# Altium footprint library PcbLib1.PcbLib: 24 footprints (part 1 of 2)
Each footprint in its own frame and in the unit in brackets; x right, y up, seen from the top. Pads: shape width x height; smd on the part's side, far side on the other; paste and mask are expansions set on the pad; w line width, h text height; cw(c..) or ccw(c..) is an arc to the next point about the centre after c.
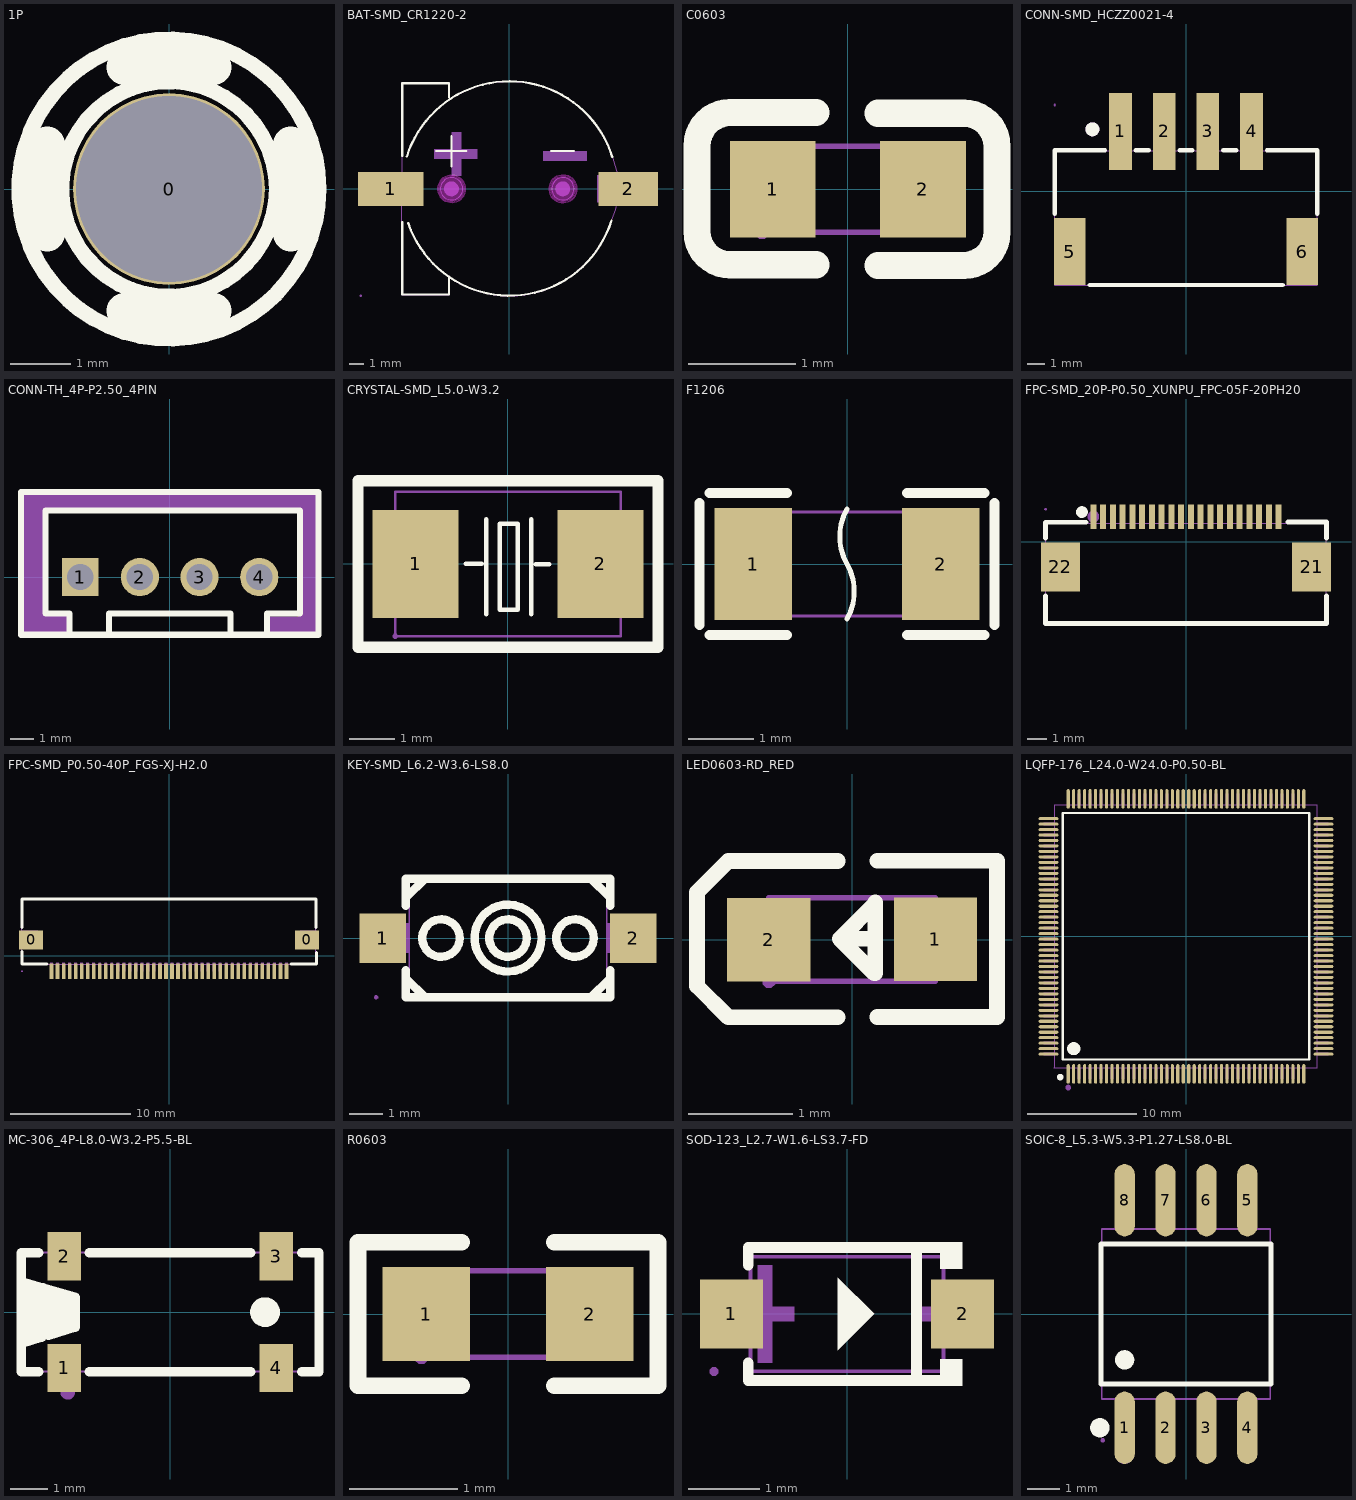
[diagram p0: the footprints below, top view; thin cyan lines are the x and y axes]

## 1P [mm]
pads (1):
  round 3.2 hole 3.1 mask+0.014: 0(0,0)
Top Overlay:
  circle w0.254: c0,0 r1.791
  circle w0.254: c0,0 r2.502
  lines w0.6: -2.03,-0.739 cw(c0,0) -2.03,0.739 ; -0.739,-2.03 ccw(c0,0) 0.739,-2.03 ; -0.739,2.03 cw(c0,0) 0.739,2.03 ; 2.03,-0.739 ccw(c0,0) 2.03,0.739

## BAT-SMD_CR1220-2 [mm]
pads (2):
  rect 4.4x2.3 smd paste+0 mask+0.05: 1(-8,0)
  rect 4x2.3 smd paste+0 mask+0.05: 2(8,0)
Top Overlay:
  lines w0.15: -7.22,-2.231 -7.22,-7.112 -4.064,-7.112 -4.064,-5.912 ; -7.22,2.231 -7.22,7.112 -4.064,7.112 -4.064,6.171 ; -6.911,2.175 cw(c0,0) 6.918,2.154 ; -6.815,-2.297 ccw(c0,0) 6.871,-2.124 ; -4.928,2.54 -2.896,2.54 ; -3.912,1.524 -3.912,3.556 ; 2.819,2.54 4.343,2.54
Keep-Out Layer:
  board cut-out: 4.35,0 4.349,0.098 4.296,0.287 4.197,0.456 4.058,0.594 3.887,0.691 3.698,0.741 3.502,0.741 3.313,0.691 3.142,0.594 3.003,0.456 2.904,0.287 2.851,0.098 2.85,0 2.851,-0.098 2.904,-0.287 3.003,-0.456 3.142,-0.594 3.313,-0.691 3.502,-0.741 3.698,-0.741 3.887,-0.691 4.058,-0.594 4.197,-0.456 4.296,-0.287 4.349,-0.098
  board cut-out: -3.15,0 -3.151,0.098 -3.204,0.287 -3.303,0.456 -3.442,0.594 -3.612,0.691 -3.802,0.741 -3.998,0.741 -4.187,0.691 -4.357,0.594 -4.497,0.456 -4.596,0.287 -4.649,0.098 -4.65,0 -4.649,-0.098 -4.596,-0.287 -4.497,-0.456 -4.357,-0.594 -4.187,-0.691 -3.998,-0.741 -3.802,-0.741 -3.612,-0.691 -3.442,-0.594 -3.303,-0.456 -3.204,-0.287 -3.151,-0.098
Keep-Out Layer:
  circle w0.1: c-3.9,0 r0.926
  circle w0.1: c3.6,0 r0.933
Mechanical 1:
  circle w0.025: c3.6,0 r0.75
  circle w0.025: c-3.9,0 r0.75
Mechanical 6:
  circle w0.5: c3.581,0 r0.25
  circle w0.5: c-3.912,0 r0.25
  region: -5.08,2.667 -2.159,2.667 -2.159,2.032 -5.08,2.032
  region: -3.898,0.873 -3.898,3.794 -3.263,3.794 -3.263,0.873
  region: 2.271,2.516 5.192,2.516 5.192,1.881 2.271,1.881
Mechanical 15:
  region: -9.96,-7.206 -9.96,-7.181 -9.995,-7.146 -10.045,-7.146 -10.08,-7.181 -10.08,-7.206 -10.08,-7.231 -10.045,-7.266 -9.995,-7.266 -9.96,-7.231
  region: 9.32,-0.9 5.92,-0.9 5.92,0.9 9.32,0.9
  region: -10.02,0.9 -6.62,0.9 -6.62,-0.9 -10.02,-0.9
  lines w0.051: -7.227,7.143 -4.025,7.143 -4.029,7.138 -4.029,6.158 -4.034,6.026 -3.892,6.12 -3.737,6.213 -3.533,6.328 -2.705,6.719 -2.26,6.874 -1.822,7.001 -1.372,7.108 -0.913,7.183 -0.43,7.221 0.047,7.243 0.92,7.185 1.359,7.11 1.772,7.015 2.202,6.897 2.616,6.754 3.437,6.38 4.304,5.829 4.691,5.512 5.066,5.174 5.711,4.465 6.281,3.597 6.671,2.831 6.938,2.064 7.241,1.031 7.344,0.515 7.382,-0.006 7.334,-0.461 7.258,-0.92 7.156,-1.399 6.986,-1.838 6.681,-2.672 6.281,-3.543 5.813,-4.226 5.559,-4.55 5.277,-4.874 4.979,-5.172 4.665,-5.454 4.359,-5.715 4.033,-5.951 3.59,-6.24 3.118,-6.481 2.165,-6.879 1.092,-7.119 0.544,-7.183 0.003,-7.206 -0.521,-7.188 -1.045,-7.132 -1.568,-7.029 -2.092,-6.898 -2.614,-6.711 -3.131,-6.487 -3.645,-6.212 -3.896,-6.049 -4.04,-5.967 -4.064,-5.857 -4.064,-7.127 -7.239,-7.127 -7.239,-0.523 -7.227,-0.511 -7.227,7.142 ; -7.227,7.142 -7.227,7.143
Multi-Layer keep-out:
  circle w0.254: c3.6,0 r0.75
  circle w0.254: c-3.9,0 r0.75

## C0603 [mm]
pads (2):
  rect 0.8x0.9 smd: 1(-0.7,0) 2(0.7,0)
Top Overlay:
  lines w0.254: -0.296,-0.704 -1.096,-0.704 cw(c-1.096,-0.394) -1.406,-0.394 -1.405,0.406 cw(c-1.096,0.406) -1.096,0.715 -0.296,0.715 ; 0.28,-0.71 1.08,-0.71 ccw(c1.08,-0.4) 1.39,-0.4 1.39,0.4 ccw(c1.08,0.4) 1.08,0.71 0.28,0.71
Mechanical 15:
  region: 0.8,-0.4 0.8,0.4 0.5,0.4 0.5,-0.4
  region: -0.8,-0.4 -0.8,0.4 -0.5,0.4 -0.5,-0.4
  region: -0.74,-0.4 -0.74,-0.375 -0.775,-0.34 -0.825,-0.34 -0.86,-0.375 -0.86,-0.4 -0.86,-0.425 -0.825,-0.46 -0.775,-0.46 -0.74,-0.425 -0.74,-0.4
  lines w0.051: -0.8,-0.4 0.8,-0.4 0.8,0.4 -0.8,0.4 -0.8,-0.4

## CONN-SMD_HCZZ0021-4 [mm]
pads (6):
  rect 1.3x4.4 smd: 1(-3.75,3.438) 2(-1.25,3.438) 3(1.25,3.438) 4(3.75,3.438)
  rect 1.8x3.85 smd: 5(-6.65,-3.438) 6(6.65,-3.438)
Top Overlay:
  circle w0.4: c-5.35,3.55 r0.2
  lines w0.254: -7.5,-1.281 -7.5,2.35 -4.631,2.35 ; -5.5,-5.35 5.519,-5.35 ; -2.869,2.35 -2.131,2.35 ; -0.369,2.35 0.369,2.35 ; 2.131,2.35 2.869,2.35 ; 4.631,2.35 7.5,2.35 7.5,-1.281
Mechanical 6:
  circle w0.4: c-5.35,3.55 r0.2
Mechanical 15:
  region: -7.44,4.937 -7.44,4.962 -7.475,4.997 -7.525,4.997 -7.56,4.962 -7.56,4.937 -7.56,4.913 -7.525,4.877 -7.475,4.877 -7.44,4.913
  region: 3.43,4.938 4.07,4.938 4.07,1.938 3.43,1.938
  region: 0.93,4.938 1.57,4.938 1.57,1.938 0.93,1.938
  region: -1.57,4.938 -0.93,4.938 -0.93,1.938 -1.57,1.938
  region: -4.07,4.938 -3.43,4.938 -3.43,1.938 -4.07,1.938
  region: -6.97,-1.937 -6.33,-1.937 -6.33,-4.937 -6.97,-4.937
  region: 6.33,-1.937 6.97,-1.937 6.97,-4.937 6.33,-4.937
  lines w0.051: -7.5,-5.362 -7.5,2.338 7.5,2.338 7.5,-5.362 -7.5,-5.362

## CONN-TH_4P-P2.50_4PIN [mm]
pads (4):
  rect 1.524x1.6 hole 1.1: 1(-3.75,0)
  round 1.6 hole 1.1: 2(-1.25,0) 3(1.25,0) 4(3.75,0)
Top Overlay:
  lines w0.254: -4.191,-2.413 -4.191,-2.286 -4.191,-1.524 -5.207,-1.524 -5.207,2.794 5.461,2.794 5.461,-1.524 4.064,-1.524 4.064,-2.286 ; -2.54,-2.413 -2.54,-1.524 2.54,-1.524 2.54,-2.413 ; -6.223,-2.413 -6.223,3.556 6.223,3.556 6.223,-2.413 -6.223,-2.413
Mechanical 6:
  region: 4.064,-2.413 4.064,-1.651 5.334,-1.651 5.461,-1.524 5.461,2.794 -5.207,2.794 -5.207,-1.524 -4.191,-1.524 -4.191,-2.413 -6.223,-2.413 -6.223,3.556 6.223,3.556 6.223,-2.413
Mechanical 15:
  region: 3.43,0.32 4.07,0.32 4.07,-0.32 3.43,-0.32
  region: 0.93,0.32 1.57,0.32 1.57,-0.32 0.93,-0.32
  region: -1.57,0.32 -0.93,0.32 -0.93,-0.32 -1.57,-0.32
  region: -4.07,0.32 -3.43,0.32 -3.43,-0.32 -4.07,-0.32
  region: -6.19,-2.4 -6.19,-2.375 -6.225,-2.34 -6.275,-2.34 -6.31,-2.375 -6.31,-2.4 -6.31,-2.425 -6.275,-2.46 -6.225,-2.46 -6.19,-2.425 -6.19,-2.4
  lines w0.051: -6.25,-2.4 6.25,-2.4 6.25,3.5 -6.25,3.5 -6.25,-2.4

## CRYSTAL-SMD_L5.0-W3.2 [mm]
pads (2):
  rect 1.9x2.4 smd: 1(-2.05,0) 2(2.05,0)
Top Overlay:
  lines w0.1: -0.94,0 -0.584,0 ; -0.483,-1.109 -0.483,0.991 ; 0.517,-1.109 0.517,0.991 ; 0.617,-0.009 0.917,-0.009 ; -0.183,-1.009 -0.183,0.89 0.217,0.89 0.217,-1.009 -0.183,-1.009
  lines w0.254: -3.325,-1.85 3.325,-1.85 3.325,-0.7 3.325,0.7 3.325,1.85 -3.325,1.85 -3.325,0.7 -3.325,-0.7 -3.325,-1.85
Mechanical 15:
  region: -2.44,-1.6 -2.44,-1.575 -2.475,-1.54 -2.525,-1.54 -2.56,-1.575 -2.56,-1.6 -2.56,-1.625 -2.525,-1.66 -2.475,-1.66 -2.44,-1.625 -2.44,-1.6
  region: -2.4,1 -1.3,1 -1.3,-1 -2.4,-1
  region: 1.3,1 2.4,1 2.4,-1 1.3,-1
  lines w0.051: -2.5,-1.6 -2.5,1.6 2.5,1.6 2.5,-1.6 -2.5,-1.6

## F1206 [mm]
pads (2):
  rect 1.19x1.728 smd: 1(-1.445,0) 2(1.445,0)
Top Overlay:
  lines w0.076: 0,-0.845 ccw(c-0.732,-0.422) 0,0 cw(c0.732,0.422) 0,0.845
  lines w0.152: -2.269,-0.94 -2.269,0.94 ; -2.116,-1.093 -0.926,-1.093 ; -2.116,1.093 -0.926,1.093 ; 0.926,-1.093 2.116,-1.093 ; 0.926,1.093 2.116,1.093 ; 2.269,-0.94 2.269,0.94
Mechanical 15:
  region: 1.1,-0.8 1.6,-0.8 1.6,0.8 1.1,0.8
  region: -1.6,-0.8 -1.1,-0.8 -1.1,0.8 -1.6,0.8
  region: -1.54,-0.8 -1.541,-0.776 -1.576,-0.742 -1.624,-0.742 -1.659,-0.776 -1.66,-0.8 -1.659,-0.824 -1.624,-0.858 -1.576,-0.858 -1.541,-0.824
  lines w0.051: -1.6,-0.8 -1.6,0.8 1.6,0.8 1.6,-0.8 -1.6,-0.8

## FPC-SMD_20P-P0.50_XUNPU_FPC-05F-20PH20 [mm]
pads (22):
  rect 0.3x1.25 smd paste+0 mask+0.05: 1(-4.75,1.288) 2(-4.25,1.288) 3(-3.75,1.288) 4(-3.25,1.288) 5(-2.75,1.288) 6(-2.25,1.288) 7(-1.75,1.288) 8(-1.25,1.288) 9(-0.75,1.288) 10(-0.25,1.288) 11(0.25,1.288) 12(0.75,1.288) 13(1.25,1.288) 14(1.75,1.288) 15(2.25,1.288) 16(2.75,1.288) 17(3.25,1.288) 18(3.75,1.288) 19(4.25,1.288) 20(4.75,1.288)
  rect 2x2.5 smd paste+0 mask+0.05: 21(6.44,-1.287) 22(-6.44,-1.287)
Top Overlay:
  circle w0.3: c-5.334,1.524 r0.15
  lines w0.254: -7.2,-2.769 -7.2,-3.912 -7.2,-4.191 7.2,-4.191 7.2,-3.912 7.2,-2.769 ; -7.2,0.194 -7.2,1 -5.131,1 ; 5.223,1.016 7.2,1.016 7.2,0.194
Mechanical 6:
  circle w0.3: c-4.75,1.288 r0.15
Mechanical 15:
  region: -7.14,1.663 -7.141,1.687 -7.176,1.721 -7.224,1.721 -7.259,1.687 -7.26,1.662 -7.259,1.638 -7.224,1.604 -7.175,1.604 -7.141,1.638 -7.14,1.663
  region: 4.675,1.663 4.825,1.663 4.825,0.912 4.675,0.912
  region: 4.175,1.663 4.325,1.663 4.325,0.912 4.175,0.912
  region: 3.675,1.663 3.825,1.663 3.825,0.912 3.675,0.912
  region: 3.175,1.663 3.325,1.663 3.325,0.912 3.175,0.912
  region: 2.675,1.663 2.825,1.663 2.825,0.912 2.675,0.912
  region: 2.175,1.663 2.325,1.663 2.325,0.912 2.175,0.912
  region: 1.675,1.663 1.825,1.663 1.825,0.912 1.675,0.912
  region: 1.175,1.663 1.325,1.663 1.325,0.912 1.175,0.912
  region: 0.675,1.663 0.825,1.663 0.825,0.912 0.675,0.912
  region: 0.175,1.663 0.325,1.663 0.325,0.912 0.175,0.912
  region: -0.325,1.663 -0.175,1.663 -0.175,0.912 -0.325,0.912
  region: -0.825,1.663 -0.675,1.663 -0.675,0.912 -0.825,0.912
  region: -1.325,1.663 -1.175,1.663 -1.175,0.912 -1.325,0.912
  region: -1.825,1.663 -1.675,1.663 -1.675,0.912 -1.825,0.912
  region: -2.325,1.663 -2.175,1.663 -2.175,0.912 -2.325,0.912
  region: -2.825,1.663 -2.675,1.663 -2.675,0.912 -2.825,0.912
  region: -3.325,1.663 -3.175,1.663 -3.175,0.912 -3.325,0.912
  region: -3.825,1.663 -3.675,1.663 -3.675,0.912 -3.825,0.912
  region: -4.325,1.663 -4.175,1.663 -4.175,0.912 -4.325,0.912
  region: -4.825,1.663 -4.675,1.663 -4.675,0.912 -4.825,0.912
  region: 6,-1.788 6,-0.788 7.2,-0.788 7.2,-1.788
  region: -7.2,-1.788 -7.2,-0.788 -6,-0.788 -6,-1.788
  lines w0.051: -7.2,-4.157 -7.2,0.963 7.2,0.963 7.2,-4.157 -7.2,-4.157

## FPC-SMD_P0.50-40P_FGS-XJ-H2.0 [mm]
pads (42):
  rect 2x1.6 smd: 0(-11.45,1.3) 0(11.45,1.3)
  rect 0.3x1.3 smd paste+0 mask+0.05: 1(9.75,-1.3) 2(9.25,-1.3) 3(8.75,-1.3) 4(8.25,-1.3) 5(7.75,-1.3) 6(7.25,-1.3) 7(6.75,-1.3) 8(6.25,-1.3) 9(5.75,-1.3) 10(5.25,-1.3) 11(4.75,-1.3) 12(4.25,-1.3) 13(3.75,-1.3) 14(3.25,-1.3) 15(2.75,-1.3) 16(2.25,-1.3) 17(1.75,-1.3) 18(1.25,-1.3) 19(0.75,-1.3) 20(0.25,-1.3) 21(-0.25,-1.3) 22(-0.75,-1.3) 23(-1.25,-1.3) 24(-1.75,-1.3) 25(-2.25,-1.3) 26(-2.75,-1.3) 27(-3.25,-1.3) 28(-3.75,-1.3) 29(-4.25,-1.3) 30(-4.75,-1.3) 31(-5.25,-1.3) 32(-5.75,-1.3) 33(-6.25,-1.3) 34(-6.75,-1.3) 35(-7.25,-1.3) 36(-7.75,-1.3) 37(-8.25,-1.3) 38(-8.75,-1.3) 39(-9.25,-1.3) 40(-9.75,-1.3)
Top Overlay:
  lines w0.254: -12.2,0.35 -12.2,-0.7 -10.126,-0.7 ; -12.2,2.331 -12.2,4.7 12.2,4.7 12.2,2.331 ; 10.126,-0.7 12.25,-0.7 12.25,0.269
Mechanical 15:
  drawing of 49 lines, arcs and shapes, not listed

## KEY-SMD_L6.2-W3.6-LS8.0 [mm]
pads (2):
  rect 1.4x1.5 smd: 1(-3.8,0) 2(3.8,0)
Top Overlay:
  circle w0.254: c-2.032,0 r0.568
  circle w0.254: c2.032,0 r0.568
  circle w0.254: c0,0 r1.016
  circle w0.254: c0,0 r0.568
  lines w0.254: -3.1,-0.981 -3.1,-1.8 3.1,-1.8 3.1,-0.981 ; -3.1,0.981 -3.1,1.8 3.1,1.8 3.1,0.981 ; -3.048,-1.27 -2.54,-1.778 ; -3.048,1.27 -2.54,1.778 ; 2.54,-1.778 3.048,-1.27 ; 2.54,1.778 3.048,1.27
Mechanical 15:
  region: -2.99,0.45 -2.99,-0.45 -3.31,-0.45 -3.31,0.45
  region: -3.3,0.45 -3.3,-0.45 -4,-0.45 -4,0.45
  region: 3.3,-0.45 3.3,0.45 4,0.45 4,-0.45
  region: 2.99,-0.45 2.99,0.45 3.31,0.45 3.31,-0.45
  region: -3.94,-1.8 -3.941,-1.776 -3.976,-1.742 -4.024,-1.742 -4.059,-1.776 -4.06,-1.8 -4.059,-1.824 -4.024,-1.858 -3.976,-1.858 -3.941,-1.824 -3.94,-1.8
  lines w0.051: -3,-1.8 3,-1.8 3,1.8 -3,1.8 -3,-1.8

## LED0603-RD_RED [mm]
pads (2):
  rect 0.8x0.8 smd: 1(0.8,0.003) 2(-0.8,-0.003)
Top Overlay:
  lines w0.15: -0.14,-0.746 -1.19,-0.746 -1.49,-0.446 -1.49,-0.346 -1.49,0.354 -1.49,0.454 -1.19,0.754 -0.14,0.754 ; 0.22,0.007 -0.12,0.007 ; 0.24,-0.744 1.39,-0.744 ; 0.24,0.757 1.39,0.757 1.39,-0.723 ; -0.12,0.007 0.21,-0.323 0.22,-0.323 0.22,0.357 0.22,0.347 -0.12,0.007
Mechanical 6:
  region: 0.529,0.068 1.069,0.068 1.069,-0.062 0.529,-0.062
  region: 0.735,-0.267 0.735,0.273 0.865,0.273 0.865,-0.267
  region: -1.07,0.062 -0.53,0.062 -0.53,-0.068 -1.07,-0.068
Mechanical 15:
  region: -0.74,-0.403 -0.741,-0.379 -0.775,-0.346 -0.824,-0.346 -0.858,-0.379 -0.859,-0.403 -0.858,-0.428 -0.824,-0.461 -0.775,-0.461 -0.741,-0.428
  region: 0.5,-0.396 0.5,0.404 0.8,0.404 0.8,-0.396
  region: -0.8,-0.403 -0.8,0.397 -0.5,0.397 -0.5,-0.403
  lines w0.051: -0.8,-0.4 -0.8,0.4 0.8,0.4 0.8,-0.4 -0.8,-0.4

## LQFP-176_L24.0-W24.0-P0.50-BL [mm]
pads (176):
  oval 0.28x1.8 smd: 1(-10.75,-12.55) 2(-10.25,-12.55) 3(-9.75,-12.55) 4(-9.25,-12.55) 5(-8.75,-12.55) 6(-8.25,-12.55) 7(-7.75,-12.55) 8(-7.25,-12.55) 9(-6.75,-12.55) 10(-6.25,-12.55) 11(-5.75,-12.55) 12(-5.25,-12.55) 13(-4.75,-12.55) 14(-4.25,-12.55) 15(-3.75,-12.55) 16(-3.25,-12.55) 17(-2.75,-12.55) 18(-2.25,-12.55) 19(-1.75,-12.55) 20(-1.25,-12.55) 21(-0.75,-12.55) 22(-0.25,-12.55) 23(0.25,-12.55) 24(0.75,-12.55) 25(1.25,-12.55) 26(1.75,-12.55) 27(2.25,-12.55) 28(2.75,-12.55) 29(3.25,-12.55) 30(3.75,-12.55) 31(4.25,-12.55) 32(4.75,-12.55) 33(5.25,-12.55) 34(5.75,-12.55) 35(6.25,-12.55) 36(6.75,-12.55) 37(7.25,-12.55) 38(7.75,-12.55) 39(8.25,-12.55) 40(8.75,-12.55) 41(9.25,-12.55) 42(9.75,-12.55) 43(10.25,-12.55) 44(10.75,-12.55) 89(10.75,12.55) 90(10.25,12.55) 91(9.75,12.55) 92(9.25,12.55) 93(8.75,12.55) 94(8.25,12.55) 95(7.75,12.55) 96(7.25,12.55) 97(6.75,12.55) 98(6.25,12.55) 99(5.75,12.55) 100(5.25,12.55) 101(4.75,12.55) 102(4.25,12.55) 103(3.75,12.55) 104(3.25,12.55) 105(2.75,12.55) 106(2.25,12.55) 107(1.75,12.55) 108(1.25,12.55) 109(0.75,12.55) 110(0.25,12.55) 111(-0.25,12.55) 112(-0.75,12.55) 113(-1.25,12.55) 114(-1.75,12.55) 115(-2.25,12.55) 116(-2.75,12.55) 117(-3.25,12.55) 118(-3.75,12.55) 119(-4.25,12.55) 120(-4.75,12.55) 121(-5.25,12.55) 122(-5.75,12.55) 123(-6.25,12.55) 124(-6.75,12.55) 125(-7.25,12.55) 126(-7.75,12.55) 127(-8.25,12.55) 128(-8.75,12.55) 129(-9.25,12.55) 130(-9.75,12.55) 131(-10.25,12.55) 132(-10.75,12.55)
  oval 1.8x0.28 smd: 45(12.55,-10.75) 46(12.55,-10.25) 47(12.55,-9.75) 48(12.55,-9.25) 49(12.55,-8.75) 50(12.55,-8.25) 51(12.55,-7.75) 52(12.55,-7.25) 53(12.55,-6.75) 54(12.55,-6.25) 55(12.55,-5.75) 56(12.55,-5.25) 57(12.55,-4.75) 58(12.55,-4.25) 59(12.55,-3.75) 60(12.55,-3.25) 61(12.55,-2.75) 62(12.55,-2.25) 63(12.55,-1.75) 64(12.55,-1.25) 65(12.55,-0.75) 66(12.55,-0.25) 67(12.55,0.25) 68(12.55,0.75) 69(12.55,1.25) 70(12.55,1.75) 71(12.55,2.25) 72(12.55,2.75) 73(12.55,3.25) 74(12.55,3.75) 75(12.55,4.25) 76(12.55,4.75) 77(12.55,5.25) 78(12.55,5.75) 79(12.55,6.25) 80(12.55,6.75) 81(12.55,7.25) 82(12.55,7.75) 83(12.55,8.25) 84(12.55,8.75) 85(12.55,9.25) 86(12.55,9.75) 87(12.55,10.25) 88(12.55,10.75) 133(-12.55,10.75) 134(-12.55,10.25) 135(-12.55,9.75) 136(-12.55,9.25) 137(-12.55,8.75) 138(-12.55,8.25) 139(-12.55,7.75) 140(-12.55,7.25) 141(-12.55,6.75) 142(-12.55,6.25) 143(-12.55,5.75) 144(-12.55,5.25) 145(-12.55,4.75) 146(-12.55,4.25) 147(-12.55,3.75) 148(-12.55,3.25) 149(-12.55,2.75) 150(-12.55,2.25) 151(-12.55,1.75) 152(-12.55,1.25) 153(-12.55,0.75) 154(-12.55,0.25) 155(-12.55,-0.25) 156(-12.55,-0.75) 157(-12.55,-1.25) 158(-12.55,-1.75) 159(-12.55,-2.25) 160(-12.55,-2.75) 161(-12.55,-3.25) 162(-12.55,-3.75) 163(-12.55,-4.25) 164(-12.55,-4.75) 165(-12.55,-5.25) 166(-12.55,-5.75) 167(-12.55,-6.25) 168(-12.55,-6.75) 169(-12.55,-7.25) 170(-12.55,-7.75) 171(-12.55,-8.25) 172(-12.55,-8.75) 173(-12.55,-9.25) 174(-12.55,-9.75) 175(-12.55,-10.25) 176(-12.55,-10.75)
Top Overlay:
  lines w0.2: -11.25,-11.25 -11.25,11.25 11.25,11.25 11.25,-11.25 -11.25,-11.25
  lines w0.3: -11.481,-12.697 ccw(c-11.48,-12.847) -11.48,-12.997 ccw(c-11.48,-12.847) -11.479,-12.697
  lines w0.6: -10.249,-9.949 ccw(c-10.246,-10.249) -10.246,-10.549 ccw(c-10.246,-10.249) -10.244,-9.949
Mechanical 6:
  circle w0.254: c-10.759,-13.8 r0.131
Mechanical 15:
  drawing of 357 lines, arcs and shapes, not listed

## MC-306_4P-L8.0-W3.2-P5.5-BL [mm]
pads (4):
  rect 0.9x1.3 smd: 1(-2.85,-1.5) 2(-2.85,1.5) 3(2.85,1.5) 4(2.85,-1.5)
Top Overlay:
  circle w0.4: c2.55,0 r0.2
  region: -4,-0.85 -2.55,-0.4 -2.55,0.4 -4,0.75
  lines w0.254: -4,-1.6 -3.531,-1.6 ; -4,-1.55 -4,1.6 -3.531,1.6 ; -4,-0.842 -3.446,-0.673 ; -4,0.821 -3.412,0.65 ; -3.312,0.621 -2.55,0.4 -2.55,-0.4 -3.274,-0.621 ; -2.169,-1.6 2.169,-1.6 ; -2.169,1.6 2.169,1.6 ; 3.531,-1.6 4,-1.6 4,1.6 3.531,1.6
Mechanical 6:
  circle w0.2: c-2.75,-2.15 r0.1
Mechanical 15:
  region: -2.5,1.85 -2.5,0.95 -3,0.95 -3,1.85
  region: 2.5,1.85 2.5,0.95 3,0.95 3,1.85
  region: 2.5,-1.85 2.5,-0.95 3,-0.95 3,-1.85
  region: -2.5,-1.85 -2.5,-0.95 -3,-0.95 -3,-1.85
  region: -3.94,-1.6 -3.94,-1.575 -3.975,-1.54 -4.025,-1.54 -4.06,-1.575 -4.06,-1.6 -4.06,-1.625 -4.025,-1.66 -3.975,-1.66 -3.94,-1.625 -3.94,-1.6
  lines w0.051: -4,-1.6 4,-1.6 4,1.6 -4,1.6 -4,-1.6

## R0603 [mm]
pads (2):
  rect 0.806x0.864 smd paste-100 mask+0.051: 1(-0.753,0) 2(0.753,0)
Top Overlay:
  lines w0.152: -0.426,-0.661 -1.385,-0.661 -1.385,0.661 -0.426,0.661 ; 0.426,-0.661 1.385,-0.661 1.385,0.661 0.426,0.661
Top Paste:
  region: -0.355,0.4 -0.355,0.172 -0.735,0.172 -0.735,-0.158 -0.355,-0.158 -0.355,-0.4 -0.405,-0.45 -1.195,-0.45 -1.245,-0.4 -1.245,0.4 -1.195,0.45 -0.405,0.45
  region: 1.195,0.45 0.395,0.45 0.345,0.4 0.345,0.172 0.715,0.172 0.715,-0.158 0.345,-0.158 0.345,-0.4 0.395,-0.45 1.195,-0.45 1.245,-0.4 1.245,0.4
Mechanical 15:
  region: 0.8,-0.4 0.8,0.4 0.5,0.4 0.5,-0.4
  region: -0.8,-0.4 -0.8,0.4 -0.5,0.4 -0.5,-0.4
  region: -0.74,-0.4 -0.74,-0.375 -0.775,-0.34 -0.825,-0.34 -0.86,-0.375 -0.86,-0.4 -0.86,-0.425 -0.825,-0.46 -0.775,-0.46 -0.74,-0.425 -0.74,-0.4
  lines w0.051: -0.8,-0.4 0.8,-0.4 0.8,0.4 -0.8,0.4 -0.8,-0.4

## SOD-123_L2.7-W1.6-LS3.7-FD [mm]
pads (2):
  rect 0.88x0.96 smd: 1(-1.61,0) 2(1.61,0)
Top Overlay:
  region: 1.3,-1.003 1.3,-0.632 1.605,-0.633 1.605,-1.003
  region: 1.3,1.002 1.3,0.632 1.605,0.632 1.605,1.002
  region: 0.381,0 -0.127,0.508 -0.127,-0.508
  lines w0.152: -1.376,-0.683 -1.376,-0.926 1.376,-0.926 ; -1.376,0.683 -1.376,0.926 1.376,0.926 ; 0.967,-0.926 0.967,0.926
Mechanical 6:
  region: 1.805,-0.102 1.805,0.102 0.989,0.102 0.989,-0.102
  region: -1.551,-0.102 -1.551,0.102 -0.735,0.102 -0.735,-0.102
  region: -1.245,-0.68 -1.245,0.68 -1.041,0.68 -1.041,-0.68
Mechanical 15:
  region: -1.791,-0.8 -1.791,-0.775 -1.826,-0.74 -1.876,-0.74 -1.911,-0.775 -1.911,-0.8 -1.911,-0.825 -1.876,-0.86 -1.826,-0.86 -1.791,-0.825 -1.791,-0.8
  region: 1.511,-0.3 1.511,0.3 1.34,0.3 1.34,-0.3
  region: 1.851,-0.3 1.501,-0.3 1.501,0.3 1.851,0.3
  region: -1.511,0.3 -1.511,-0.3 -1.34,-0.3 -1.34,0.3
  region: -1.851,0.3 -1.501,0.3 -1.501,-0.3 -1.851,-0.3
  lines w0.051: -1.345,-0.8 1.345,-0.8 1.345,0.8 -1.345,0.8 -1.345,-0.8

## SOIC-8_L5.3-W5.3-P1.27-LS8.0-BL [mm]
pads (8):
  oval 0.63x2.25 smd: 1(-1.905,-3.53) 2(-0.635,-3.53) 3(0.635,-3.53) 4(1.905,-3.53) 5(1.905,3.53) 6(0.635,3.53) 7(-0.635,3.53) 8(-1.905,3.53)
Top Overlay:
  circle w0.3: c-2.672,-3.53 r0.15
  circle w0.3: c-1.905,-1.424 r0.15
  lines w0.152: -2.639,-2.176 2.639,-2.176 2.639,2.176 -2.639,2.176 -2.639,-2.176
Mechanical 6:
  circle w0.3: c-1.905,-4.35 r0.15
Mechanical 15:
  region: 1.68,3.31 1.68,2.595 2.13,2.595 2.13,3.31
  region: 1.68,3.95 1.68,3.3 2.13,3.3 2.13,3.95
  region: 0.41,3.31 0.41,2.595 0.86,2.595 0.86,3.31
  region: 0.41,3.95 0.41,3.3 0.86,3.3 0.86,3.95
  region: -0.86,3.31 -0.86,2.595 -0.41,2.595 -0.41,3.31
  region: -0.86,3.95 -0.86,3.3 -0.41,3.3 -0.41,3.95
  region: -2.13,3.31 -2.13,2.595 -1.68,2.595 -1.68,3.31
  region: -2.13,3.95 -2.13,3.3 -1.68,3.3 -1.68,3.95
  region: 1.68,-3.31 1.68,-2.595 2.13,-2.595 2.13,-3.31
  region: 1.68,-3.95 1.68,-3.3 2.13,-3.3 2.13,-3.95
  region: 0.41,-3.31 0.41,-2.595 0.86,-2.595 0.86,-3.31
  region: 0.41,-3.95 0.41,-3.3 0.86,-3.3 0.86,-3.95
  region: -0.86,-3.31 -0.86,-2.595 -0.41,-2.595 -0.41,-3.31
  region: -0.86,-3.95 -0.86,-3.3 -0.41,-3.3 -0.41,-3.95
  region: -2.13,-3.31 -2.13,-2.595 -1.68,-2.595 -1.68,-3.31
  region: -2.13,-3.95 -2.13,-3.3 -1.68,-3.3 -1.68,-3.95
  region: -2.525,-3.92 -2.525,-3.895 -2.56,-3.86 -2.61,-3.86 -2.645,-3.895 -2.645,-3.92 -2.645,-3.945 -2.61,-3.98 -2.56,-3.98 -2.525,-3.945 -2.525,-3.92
  lines w0.051: -2.615,-2.64 2.615,-2.64 2.615,2.64 -2.615,2.64 -2.615,-2.64